# Altium footprint library WR-TBL_Pluggable Connector_3.81mm.PcbLib: 201 footprints (part 3 of 13)
Each footprint in its own frame and in the unit in brackets; x right, y up, seen from the top. Pads: shape width x height; smd on the part's side, far side on the other; paste and mask are expansions set on the pad; w line width, h text height; cw(c..) or ccw(c..) is an arc to the next point about the centre after c.
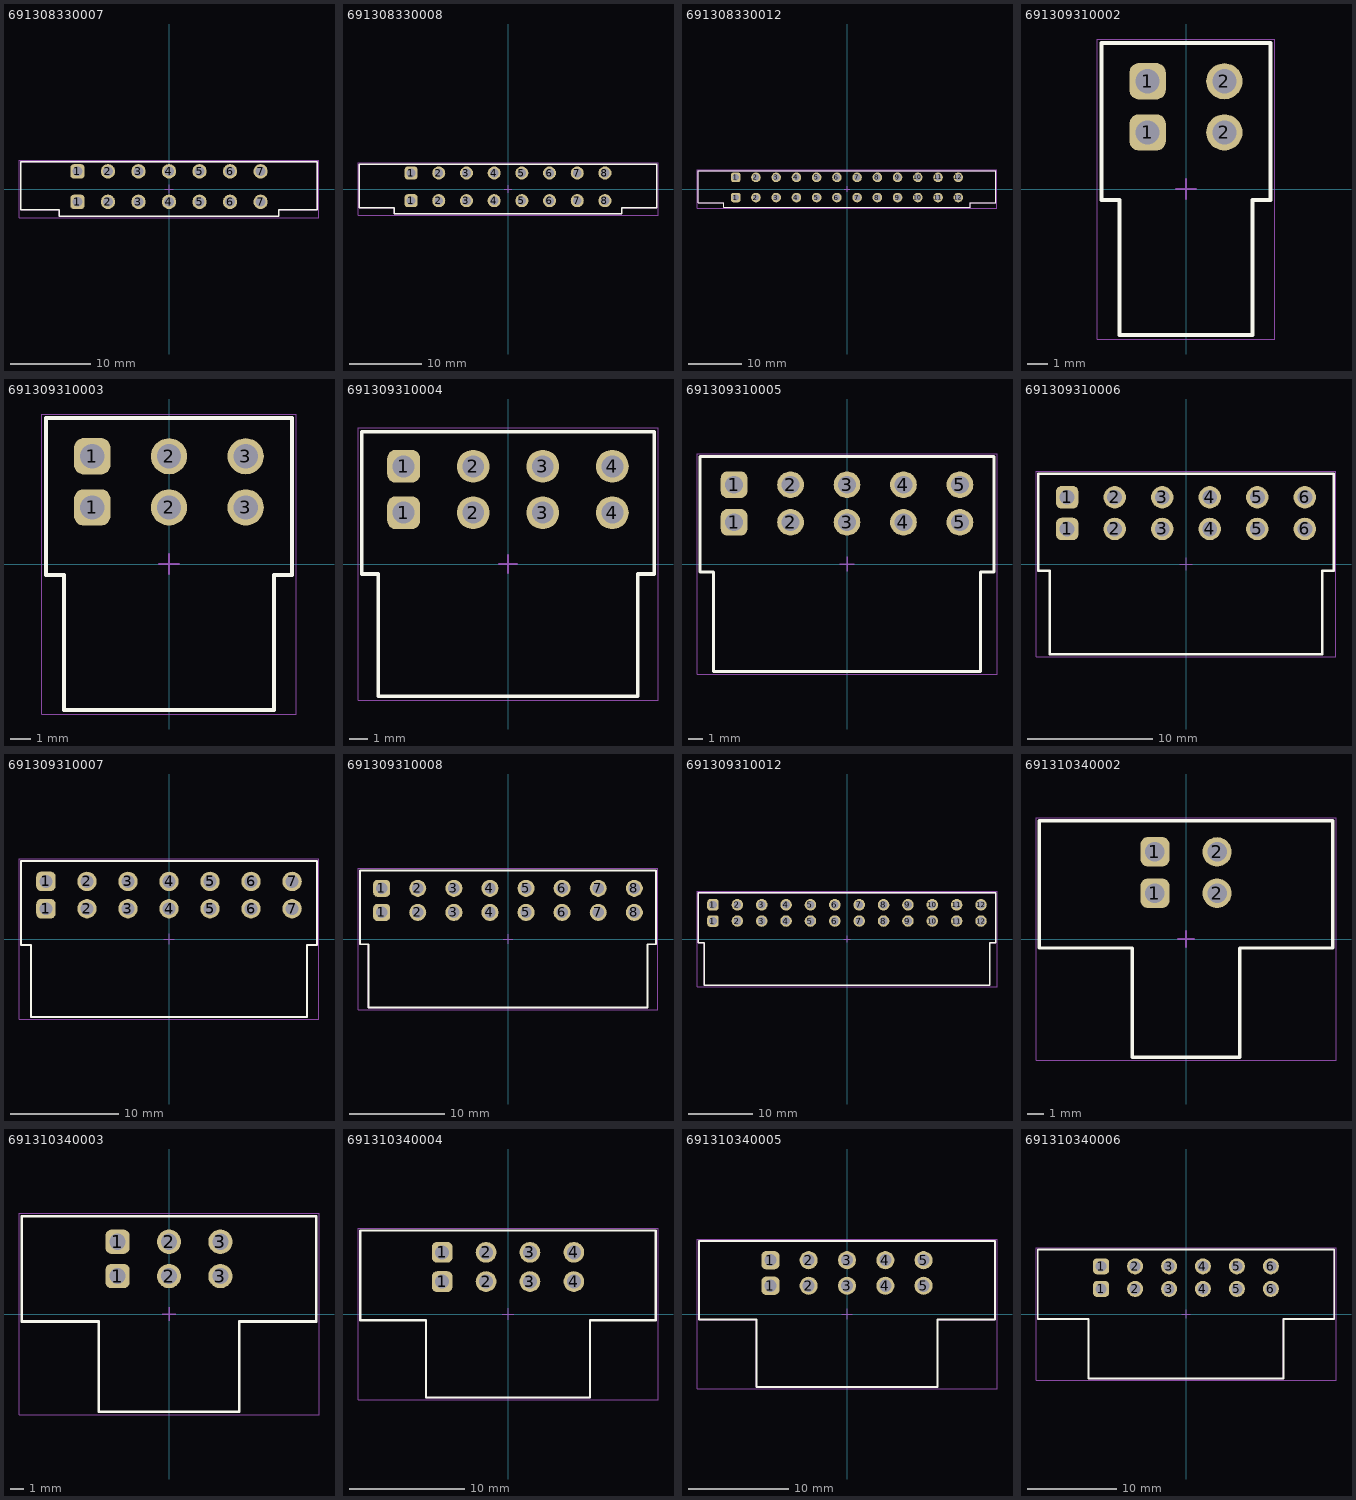
[diagram p2: the footprints below, top view; thin cyan lines are the x and y axes]

## 691308330007 [mm] "Vertical Reserved PCB Header with Flanges, pitch 3.81mm, 07p"
height 14.5
pads (14):
  rrect50% 1.8x1.8 hole 1.2: 1(-11.43,-1.61) 1(-11.43,2.2)
  round 1.8 hole 1.2: 2(-7.62,-1.61) 2(-7.62,2.2) 3(-3.81,-1.61) 3(-3.81,2.2) 4(0,-1.61) 4(0,2.2) 5(3.81,-1.61) 5(3.81,2.2) 6(7.62,-1.61) 6(7.62,2.2) 7(11.43,-1.61) 7(11.43,2.2)
Top Overlay:
  lines w0.2: -18.53,-2.6 -18.53,3.4 18.53,3.4 18.53,-2.6 13.725,-2.6 13.725,-3.4 -13.725,-3.4 -13.725,-2.6 -18.53,-2.6
Top Assembly:
  lines w0.1: -18.53,-2.6 -13.725,-2.6 -13.725,-3.4 13.725,-3.4 13.725,-2.6 18.53,-2.6 18.53,3.4 -18.53,3.4 -18.53,-2.6
Top Designator:
  text ".Designator" at -3.647,-0.357 h1
Top 3D Body:
  lines w0.1: -18.53,-2.6 -18.53,3.4 18.53,3.4 18.53,-2.6 13.725,-2.6 13.725,-3.4 -13.725,-3.4 -13.725,-2.6 -18.53,-2.6
Top Courtyard:
  lines w0.05: -18.73,-3.6 -18.73,3.6 18.73,3.6 18.73,-3.6 -18.73,-3.6
Top Component Center:
  lines w0.1: -0.5,0 0.5,0 ; 0,-0.5 0,0.5
3D body "691308330007.stp": height 14.6, standoff -3.3, extent -18.53,-3.4 18.53,3.4

## 691308330008 [mm] "Vertical Reserved PCB Header with Flanges, pitch 3.81mm, 08p"
height 14.5
pads (16):
  rrect50% 1.8x1.8 hole 1.2: 1(-13.335,-1.61) 1(-13.335,2.2)
  round 1.8 hole 1.2: 2(-9.525,-1.61) 2(-9.525,2.2) 3(-5.715,-1.61) 3(-5.715,2.2) 4(-1.905,-1.61) 4(-1.905,2.2) 5(1.905,-1.61) 5(1.905,2.2) 6(5.715,-1.61) 6(5.715,2.2) 7(9.525,-1.61) 7(9.525,2.2) 8(13.335,-1.61) 8(13.335,2.2)
Top Overlay:
  lines w0.2: -20.435,-2.6 -15.63,-2.6 -15.63,-3.4 15.63,-3.4 15.63,-2.6 20.435,-2.6 20.435,3.4 -20.435,3.4 -20.435,-2.6
Top Assembly:
  lines w0.1: -20.435,-2.6 -20.435,3.4 20.435,3.4 20.435,-2.6 15.63,-2.6 15.63,-3.4 -15.63,-3.4 -15.63,-2.6 -20.435,-2.6
Top Designator:
  text ".Designator" at -3.647,-0.357 h1
Top 3D Body:
  lines w0.1: -20.435,-2.6 -15.63,-2.6 -15.63,-3.4 15.63,-3.4 15.63,-2.6 20.435,-2.6 20.435,3.4 -20.435,3.4 -20.435,-2.6
Top Courtyard:
  lines w0.05: -20.635,-3.6 20.635,-3.6 20.635,3.6 -20.635,3.6 -20.635,-3.6
Top Component Center:
  lines w0.1: -0.5,0 0.5,0 ; 0,-0.5 0,0.5
3D body "691308330008.stp": height 14.6, standoff -3.3, extent -20.435,-3.4 20.435,3.4

## 691308330012 [mm] "Vertical Reserved PCB Header with Flanges, pitch 3.81mm, 12p"
height 14.5
pads (24):
  rrect50% 1.8x1.8 hole 1.2: 1(-20.955,-1.61) 1(-20.955,2.2)
  round 1.8 hole 1.2: 2(-17.145,-1.61) 2(-17.145,2.2) 3(-13.335,-1.61) 3(-13.335,2.2) 4(-9.525,-1.61) 4(-9.525,2.2) 5(-5.715,-1.61) 5(-5.715,2.2) 6(-1.905,-1.61) 6(-1.905,2.2) 7(1.905,-1.61) 7(1.905,2.2) 8(5.715,-1.61) 8(5.715,2.2) 9(9.525,-1.61) 9(9.525,2.2) 10(13.335,-1.61) 10(13.335,2.2) 11(17.145,-1.61) 11(17.145,2.2) 12(20.955,-1.61) 12(20.955,2.2)
Top Overlay:
  lines w0.2: -28.055,-2.6 -23.25,-2.6 -23.25,-3.4 23.25,-3.4 23.25,-2.6 28.055,-2.6 28.055,3.4 -28.055,3.4 -28.055,-2.6
Top Assembly:
  lines w0.1: -28.055,-2.6 -28.055,3.4 28.055,3.4 28.055,-2.6 23.25,-2.6 23.25,-3.4 -23.25,-3.4 -23.25,-2.6 -28.055,-2.6
Top Designator:
  text ".Designator" at -3.647,-0.357 h1
Top 3D Body:
  lines w0.1: -28.055,-2.6 -23.25,-2.6 -23.25,-3.4 23.25,-3.4 23.25,-2.6 28.055,-2.6 28.055,3.4 -28.055,3.4 -28.055,-2.6
Top Courtyard:
  lines w0.05: -28.255,-3.6 28.255,-3.6 28.255,3.6 -28.255,3.6 -28.255,-3.6
Top Component Center:
  lines w0.1: -0.5,0 0.5,0 ; 0,-0.5 0,0.5
3D body "691308330012.stp": height 14.6, standoff -3.3, extent -28.055,-3.4 28.055,3.4

## 691309310002 [mm] "Horizontal Reserved PCB Header, pitch 3.81mm, 02p"
height 6.6
pads (4):
  rrect50% 1.8x1.8 hole 1.2: 1(-1.905,2.81) 1(-1.905,5.35)
  round 1.8 hole 1.2: 2(1.905,2.81) 2(1.905,5.35)
Top Overlay:
  lines w0.2: -4.205,-0.55 -4.205,7.25 4.205,7.25 4.205,-0.55 3.305,-0.55 3.305,-7.25 -3.305,-7.25 -3.305,-0.55 -4.205,-0.55
Top Assembly:
  lines w0.1: -4.205,-0.55 -3.305,-0.55 -3.305,-7.25 3.305,-7.25 3.305,-0.55 4.205,-0.55 4.205,7.25 -4.205,7.25 -4.205,-0.55
Top Designator:
  text ".Designator" at -3.647,-0.357 h1
Top 3D Body:
  lines w0.1: -4.205,-0.55 -4.205,7.25 4.205,7.25 4.205,-0.55 3.305,-0.55 3.305,-7.25 -3.305,-7.25 -3.305,-0.55 -4.205,-0.55
Top Courtyard:
  lines w0.05: -4.405,-7.45 4.405,-7.45 4.405,7.45 -4.405,7.45 -4.405,-7.45
Top Component Center:
  lines w0.1: -0.5,0 0.5,0 ; 0,-0.5 0,0.5
3D body "691309310002.stp": height 6.85, standoff -3.35, extent -4.205,-7.25 4.205,7.25

## 691309310003 [mm] "Horizontal Reserved PCB Header, pitch 3.81mm, 03p"
height 6.6
pads (6):
  rrect50% 1.8x1.8 hole 1.2: 1(-3.81,2.81) 1(-3.81,5.35)
  round 1.8 hole 1.2: 2(0,2.81) 2(0,5.35) 3(3.81,2.81) 3(3.81,5.35)
Top Overlay:
  lines w0.2: -6.11,-0.55 -6.11,7.25 6.11,7.25 6.11,-0.55 5.21,-0.55 5.21,-7.25 -5.21,-7.25 -5.21,-0.55 -6.11,-0.55
Top Assembly:
  lines w0.1: -6.11,-0.55 -5.21,-0.55 -5.21,-7.25 5.21,-7.25 5.21,-0.55 6.11,-0.55 6.11,7.25 -6.11,7.25 -6.11,-0.55
Top Designator:
  text ".Designator" at -3.647,-0.357 h1
Top 3D Body:
  lines w0.1: -6.11,-0.55 -6.11,7.25 6.11,7.25 6.11,-0.55 5.21,-0.55 5.21,-7.25 -5.21,-7.25 -5.21,-0.55 -6.11,-0.55
Top Courtyard:
  lines w0.05: -6.31,-7.45 6.31,-7.45 6.31,7.45 -6.31,7.45 -6.31,-7.45
Top Component Center:
  lines w0.1: -0.5,0 0.5,0 ; 0,-0.5 0,0.5
3D body "691309310003.stp": height 6.85, standoff -3.35, extent -6.11,-7.25 6.11,7.25

## 691309310004 [mm] "Horizontal Reserved PCB Header, pitch 3.81mm, 04p"
height 6.6
pads (8):
  rrect50% 1.8x1.8 hole 1.2: 1(-5.715,2.81) 1(-5.715,5.35)
  round 1.8 hole 1.2: 2(-1.905,2.81) 2(-1.905,5.35) 3(1.905,2.81) 3(1.905,5.35) 4(5.715,2.81) 4(5.715,5.35)
Top Overlay:
  lines w0.2: -8.015,-0.55 -8.015,7.25 8.015,7.25 8.015,-0.55 7.115,-0.55 7.115,-7.25 -7.115,-7.25 -7.115,-0.55 -8.015,-0.55
Top Assembly:
  lines w0.1: -8.015,-0.55 -7.115,-0.55 -7.115,-7.25 7.115,-7.25 7.115,-0.55 8.015,-0.55 8.015,7.25 -8.015,7.25 -8.015,-0.55
Top Designator:
  text ".Designator" at -3.647,-0.357 h1
Top 3D Body:
  lines w0.1: -8.015,-0.55 -8.015,7.25 8.015,7.25 8.015,-0.55 7.115,-0.55 7.115,-7.25 -7.115,-7.25 -7.115,-0.55 -8.015,-0.55
Top Courtyard:
  lines w0.05: -8.215,-7.45 8.215,-7.45 8.215,7.45 -8.215,7.45 -8.215,-7.45
Top Component Center:
  lines w0.1: -0.5,0 0.5,0 ; 0,-0.5 0,0.5
3D body "691309310004.stp": height 6.85, standoff -3.35, extent -8.015,-7.25 8.015,7.25

## 691309310005 [mm] "Horizontal Reserved PCB Header, pitch 3.81mm, 05p"
height 6.6
pads (10):
  rrect50% 1.8x1.8 hole 1.2: 1(-7.62,2.81) 1(-7.62,5.35)
  round 1.8 hole 1.2: 2(-3.81,2.81) 2(-3.81,5.35) 3(0,2.81) 3(0,5.35) 4(3.81,2.81) 4(3.81,5.35) 5(7.62,2.81) 5(7.62,5.35)
Top Overlay:
  lines w0.2: -9.92,-0.55 -9.92,7.25 9.92,7.25 9.92,-0.55 9.02,-0.55 9.02,-7.25 -9.02,-7.25 -9.02,-0.55 -9.92,-0.55
Top Assembly:
  lines w0.1: -9.92,-0.55 -9.02,-0.55 -9.02,-7.25 9.02,-7.25 9.02,-0.55 9.92,-0.55 9.92,7.25 -9.92,7.25 -9.92,-0.55
Top Designator:
  text ".Designator" at -3.647,-0.357 h1
Top 3D Body:
  lines w0.1: -9.92,-0.55 -9.92,7.25 9.92,7.25 9.92,-0.55 9.02,-0.55 9.02,-7.25 -9.02,-7.25 -9.02,-0.55 -9.92,-0.55
Top Courtyard:
  lines w0.05: -10.12,-7.45 10.12,-7.45 10.12,7.45 -10.12,7.45 -10.12,-7.45
Top Component Center:
  lines w0.1: -0.5,0 0.5,0 ; 0,-0.5 0,0.5
3D body "691309310005.stp": height 6.85, standoff -3.35, extent -9.92,-7.25 9.92,7.25

## 691309310006 [mm] "Horizontal Reserved PCB Header, pitch 3.81mm, 06p"
height 6.6
pads (12):
  rrect50% 1.8x1.8 hole 1.2: 1(-9.525,2.81) 1(-9.525,5.35)
  round 1.8 hole 1.2: 2(-5.715,2.81) 2(-5.715,5.35) 3(-1.905,2.81) 3(-1.905,5.35) 4(1.905,2.81) 4(1.905,5.35) 5(5.715,2.81) 5(5.715,5.35) 6(9.525,2.81) 6(9.525,5.35)
Top Overlay:
  lines w0.2: -11.825,-0.55 -11.825,7.25 11.825,7.25 11.825,-0.55 10.925,-0.55 10.925,-7.25 -10.925,-7.25 -10.925,-0.55 -11.825,-0.55
Top Assembly:
  lines w0.1: -11.825,-0.55 -10.925,-0.55 -10.925,-7.25 10.925,-7.25 10.925,-0.55 11.825,-0.55 11.825,7.25 -11.825,7.25 -11.825,-0.55
Top Designator:
  text ".Designator" at -3.647,-0.357 h1
Top 3D Body:
  lines w0.1: -11.825,-0.55 -11.825,7.25 11.825,7.25 11.825,-0.55 10.925,-0.55 10.925,-7.25 -10.925,-7.25 -10.925,-0.55 -11.825,-0.55
Top Courtyard:
  lines w0.05: -12.025,-7.45 12.025,-7.45 12.025,7.45 -12.025,7.45 -12.025,-7.45
Top Component Center:
  lines w0.1: -0.5,0 0.5,0 ; 0,-0.5 0,0.5
3D body "691309310006.stp": height 6.85, standoff -3.35, extent -11.825,-7.25 11.825,7.25

## 691309310007 [mm] "Horizontal Reserved PCB Header, pitch 3.81mm, 07p"
height 6.6
pads (14):
  rrect50% 1.8x1.8 hole 1.2: 1(-11.43,2.81) 1(-11.43,5.35)
  round 1.8 hole 1.2: 2(-7.62,2.81) 2(-7.62,5.35) 3(-3.81,2.81) 3(-3.81,5.35) 4(0,2.81) 4(0,5.35) 5(3.81,2.81) 5(3.81,5.35) 6(7.62,2.81) 6(7.62,5.35) 7(11.43,2.81) 7(11.43,5.35)
Top Overlay:
  lines w0.2: -13.73,-0.55 -13.73,7.25 13.73,7.25 13.73,-0.55 12.83,-0.55 12.83,-7.25 -12.83,-7.25 -12.83,-0.55 -13.73,-0.55
Top Assembly:
  lines w0.1: -13.73,-0.55 -12.83,-0.55 -12.83,-7.25 12.83,-7.25 12.83,-0.55 13.73,-0.55 13.73,7.25 -13.73,7.25 -13.73,-0.55
Top Designator:
  text ".Designator" at -3.647,-0.357 h1
Top 3D Body:
  lines w0.1: -13.73,-0.55 -13.73,7.25 13.73,7.25 13.73,-0.55 12.83,-0.55 12.83,-7.25 -12.83,-7.25 -12.83,-0.55 -13.73,-0.55
Top Courtyard:
  lines w0.05: -13.93,-7.45 13.93,-7.45 13.93,7.45 -13.93,7.45 -13.93,-7.45
Top Component Center:
  lines w0.1: -0.5,0 0.5,0 ; 0,-0.5 0,0.5
3D body "691309310007.stp": height 6.85, standoff -3.35, extent -13.73,-7.25 13.73,7.25

## 691309310008 [mm] "Horizontal Reserved PCB Header, pitch 3.81mm, 08p"
height 6.6
pads (16):
  rrect50% 1.8x1.8 hole 1.2: 1(-13.335,2.81) 1(-13.335,5.35)
  round 1.8 hole 1.2: 2(-9.525,2.81) 2(-9.525,5.35) 3(-5.715,2.81) 3(-5.715,5.35) 4(-1.905,2.81) 4(-1.905,5.35) 5(1.905,2.81) 5(1.905,5.35) 6(5.715,2.81) 6(5.715,5.35) 7(9.525,2.81) 7(9.525,5.35) 8(13.335,2.81) 8(13.335,5.35)
Top Overlay:
  lines w0.2: -15.635,-0.55 -14.735,-0.55 -14.735,-7.25 14.735,-7.25 14.735,-0.55 15.635,-0.55 15.635,7.25 -15.635,7.25 -15.635,-0.55
Top Assembly:
  lines w0.1: -15.635,-0.55 -15.635,7.25 15.635,7.25 15.635,-0.55 14.735,-0.55 14.735,-7.25 -14.735,-7.25 -14.735,-0.55 -15.635,-0.55
Top Designator:
  text ".Designator" at -3.647,-0.357 h1
Top 3D Body:
  lines w0.1: -15.635,-0.55 -14.735,-0.55 -14.735,-7.25 14.735,-7.25 14.735,-0.55 15.635,-0.55 15.635,7.25 -15.635,7.25 -15.635,-0.55
Top Courtyard:
  lines w0.05: -15.835,-7.45 -15.835,7.45 15.835,7.45 15.835,-7.45 -15.835,-7.45
Top Component Center:
  lines w0.1: -0.5,0 0.5,0 ; 0,-0.5 0,0.5
3D body "691309310008.stp": height 6.85, standoff -3.35, extent -15.635,-7.25 15.635,7.25

## 691309310012 [mm] "Horizontal Reserved PCB Header, pitch 3.81mm, 12p"
height 6.6
pads (24):
  rrect50% 1.8x1.8 hole 1.2: 1(-20.955,2.81) 1(-20.955,5.35)
  round 1.8 hole 1.2: 2(-17.145,2.81) 2(-17.145,5.35) 3(-13.335,2.81) 3(-13.335,5.35) 4(-9.525,2.81) 4(-9.525,5.35) 5(-5.715,2.81) 5(-5.715,5.35) 6(-1.905,2.81) 6(-1.905,5.35) 7(1.905,2.81) 7(1.905,5.35) 8(5.715,2.81) 8(5.715,5.35) 9(9.525,2.81) 9(9.525,5.35) 10(13.335,2.81) 10(13.335,5.35) 11(17.145,2.81) 11(17.145,5.35) 12(20.955,2.81) 12(20.955,5.35)
Top Overlay:
  lines w0.2: -23.255,-0.55 -22.355,-0.55 -22.355,-7.25 22.355,-7.25 22.355,-0.55 23.255,-0.55 23.255,7.25 -23.255,7.25 -23.255,-0.55
Top Assembly:
  lines w0.1: -23.255,-0.55 -23.255,7.25 23.255,7.25 23.255,-0.55 22.355,-0.55 22.355,-7.25 -22.355,-7.25 -22.355,-0.55 -23.255,-0.55
Top Designator:
  text ".Designator" at -3.647,-0.357 h1
Top 3D Body:
  lines w0.1: -23.255,-0.55 -22.355,-0.55 -22.355,-7.25 22.355,-7.25 22.355,-0.55 23.255,-0.55 23.255,7.25 -23.255,7.25 -23.255,-0.55
Top Courtyard:
  lines w0.05: -23.455,-7.45 -23.455,7.45 23.455,7.45 23.455,-7.45 -23.455,-7.45
Top Component Center:
  lines w0.1: -0.5,0 0.5,0 ; 0,-0.5 0,0.5
3D body "691309310012.stp": height 6.85, standoff -3.35, extent -23.255,-7.25 23.255,7.25

## 691310340002 [mm] "Horizontal Reversed PCB Header with Flanges, pitch 3.81mm, 02p"
height 6.8
pads (4):
  rrect50% 1.8x1.8 hole 1.2: 1(-1.905,2.81) 1(-1.905,5.35)
  round 1.8 hole 1.2: 2(1.905,2.81) 2(1.905,5.35)
Top Overlay:
  lines w0.2: -9.005,-0.55 -9.005,7.25 9.005,7.25 9.005,-0.55 3.305,-0.55 3.305,-7.25 -3.305,-7.25 -3.305,-0.55 -9.005,-0.55
Top Assembly:
  lines w0.1: -9.005,-0.55 -3.305,-0.55 -3.305,-7.25 3.305,-7.25 3.305,-0.55 9.005,-0.55 9.005,7.25 -9.005,7.25 -9.005,-0.55
Top Designator:
  text ".Designator" at -3.647,-0.357 h1
Top 3D Body:
  lines w0.1: -9.005,-0.55 -9.005,7.25 9.005,7.25 9.005,-0.55 3.305,-0.55 3.305,-7.25 -3.305,-7.25 -3.305,-0.55 -9.005,-0.55
Top Courtyard:
  lines w0.05: -9.205,-7.45 -9.205,7.45 9.205,7.45 9.205,-7.45 -9.205,-7.45
Top Component Center:
  lines w0.1: -0.5,0 0.5,0 ; 0,-0.5 0,0.5
3D body "691310340002.stp": height 6.85, standoff -3.35, extent -9.005,-7.25 9.005,7.25

## 691310340003 [mm] "Horizontal Reversed PCB Header with Flanges, pitch 3.81mm, 03p"
height 6.8
pads (6):
  rrect50% 1.8x1.8 hole 1.2: 1(-3.81,2.81) 1(-3.81,5.35)
  round 1.8 hole 1.2: 2(0,2.81) 2(0,5.35) 3(3.81,2.81) 3(3.81,5.35)
Top Overlay:
  lines w0.2: -10.91,-0.55 -10.91,7.25 10.91,7.25 10.91,-0.55 5.21,-0.55 5.21,-7.25 -5.21,-7.25 -5.21,-0.55 -10.91,-0.55
Top Assembly:
  lines w0.1: -10.91,-0.55 -5.21,-0.55 -5.21,-7.25 5.21,-7.25 5.21,-0.55 10.91,-0.55 10.91,7.25 -10.91,7.25 -10.91,-0.55
Top Designator:
  text ".Designator" at -3.647,-0.357 h1
Top 3D Body:
  lines w0.1: -10.91,-0.55 -10.91,7.25 10.91,7.25 10.91,-0.55 5.21,-0.55 5.21,-7.25 -5.21,-7.25 -5.21,-0.55 -10.91,-0.55
Top Courtyard:
  lines w0.05: -11.11,-7.45 -11.11,7.45 11.11,7.45 11.11,-7.45 -11.11,-7.45
Top Component Center:
  lines w0.1: -0.5,0 0.5,0 ; 0,-0.5 0,0.5
3D body "691310340003.stp": height 6.85, standoff -3.35, extent -10.91,-7.25 10.91,7.25

## 691310340004 [mm] "Horizontal Reversed PCB Header with Flanges, pitch 3.81mm, 04p"
height 6.8
pads (8):
  rrect50% 1.8x1.8 hole 1.2: 1(-5.715,2.81) 1(-5.715,5.35)
  round 1.8 hole 1.2: 2(-1.905,2.81) 2(-1.905,5.35) 3(1.905,2.81) 3(1.905,5.35) 4(5.715,2.81) 4(5.715,5.35)
Top Overlay:
  lines w0.2: -12.815,-0.55 -7.115,-0.55 -7.115,-7.25 7.115,-7.25 7.115,-0.55 12.815,-0.55 12.815,7.25 -12.815,7.25 -12.815,-0.55
Top Assembly:
  lines w0.1: -12.815,-0.55 -12.815,7.25 12.815,7.25 12.815,-0.55 7.115,-0.55 7.115,-7.25 -7.115,-7.25 -7.115,-0.55 -12.815,-0.55
Top Designator:
  text ".Designator" at -3.647,-0.357 h1
Top 3D Body:
  lines w0.1: -12.815,-0.55 -7.115,-0.55 -7.115,-7.25 7.115,-7.25 7.115,-0.55 12.815,-0.55 12.815,7.25 -12.815,7.25 -12.815,-0.55
Top Courtyard:
  lines w0.05: -13.015,-7.45 13.015,-7.45 13.015,7.45 -13.015,7.45 -13.015,-7.45
Top Component Center:
  lines w0.1: -0.5,0 0.5,0 ; 0,-0.5 0,0.5
3D body "691310340004.stp": height 6.85, standoff -3.35, extent -12.815,-7.25 12.815,7.25

## 691310340005 [mm] "Horizontal Reversed PCB Header with Flanges, pitch 3.81mm, 05p"
height 6.8
pads (10):
  rrect50% 1.8x1.8 hole 1.2: 1(-7.62,2.81) 1(-7.62,5.35)
  round 1.8 hole 1.2: 2(-3.81,2.81) 2(-3.81,5.35) 3(0,2.81) 3(0,5.35) 4(3.81,2.81) 4(3.81,5.35) 5(7.62,2.81) 5(7.62,5.35)
Top Overlay:
  lines w0.2: -14.72,-0.55 -14.72,7.25 14.72,7.25 14.72,-0.55 9.02,-0.55 9.02,-7.25 -9.02,-7.25 -9.02,-0.55 -14.72,-0.55
Top Assembly:
  lines w0.1: -14.72,-0.55 -9.02,-0.55 -9.02,-7.25 9.02,-7.25 9.02,-0.55 14.72,-0.55 14.72,7.25 -14.72,7.25 -14.72,-0.55
Top Designator:
  text ".Designator" at -3.647,-0.357 h1
Top 3D Body:
  lines w0.1: -14.72,-0.55 -14.72,7.25 14.72,7.25 14.72,-0.55 9.02,-0.55 9.02,-7.25 -9.02,-7.25 -9.02,-0.55 -14.72,-0.55
Top Courtyard:
  lines w0.05: -14.92,-7.45 -14.92,7.45 14.92,7.45 14.92,-7.45 -14.92,-7.45
Top Component Center:
  lines w0.1: -0.5,0 0.5,0 ; 0,-0.5 0,0.5
3D body "691310340005.stp": height 6.85, standoff -3.35, extent -14.72,-7.25 14.72,7.25

## 691310340006 [mm] "Horizontal Reversed PCB Header with Flanges, pitch 3.81mm, 06p"
height 6.8
pads (12):
  rrect50% 1.8x1.8 hole 1.2: 1(-9.525,2.81) 1(-9.525,5.35)
  round 1.8 hole 1.2: 2(-5.715,2.81) 2(-5.715,5.35) 3(-1.905,2.81) 3(-1.905,5.35) 4(1.905,2.81) 4(1.905,5.35) 5(5.715,2.81) 5(5.715,5.35) 6(9.525,2.81) 6(9.525,5.35)
Top Overlay:
  lines w0.2: -16.625,-0.55 -16.625,7.25 16.625,7.25 16.625,-0.55 10.925,-0.55 10.925,-7.25 -10.925,-7.25 -10.925,-0.55 -16.625,-0.55
Top Assembly:
  lines w0.1: -16.625,-0.55 -10.925,-0.55 -10.925,-7.25 10.925,-7.25 10.925,-0.55 16.625,-0.55 16.625,7.25 -16.625,7.25 -16.625,-0.55
Top Designator:
  text ".Designator" at -3.647,-0.357 h1
Top 3D Body:
  lines w0.1: -16.625,-0.55 -16.625,7.25 16.625,7.25 16.625,-0.55 10.925,-0.55 10.925,-7.25 -10.925,-7.25 -10.925,-0.55 -16.625,-0.55
Top Courtyard:
  lines w0.05: -16.825,-7.45 -16.825,7.45 16.825,7.45 16.825,-7.45 -16.825,-7.45
Top Component Center:
  lines w0.1: -0.5,0 0.5,0 ; 0,-0.5 0,0.5
3D body "691310340006.stp": height 6.85, standoff -3.35, extent -16.625,-7.25 16.625,7.25